# Altium footprint library MPPT_Power_board.PcbLib: 31 footprints (part 1 of 2)
Each footprint in its own frame and in the unit in brackets; x right, y up, seen from the top. Pads: shape width x height; smd on the part's side, far side on the other; paste and mask are expansions set on the pad; w line width, h text height; cw(c..) or ccw(c..) is an arc to the next point about the centre after c.
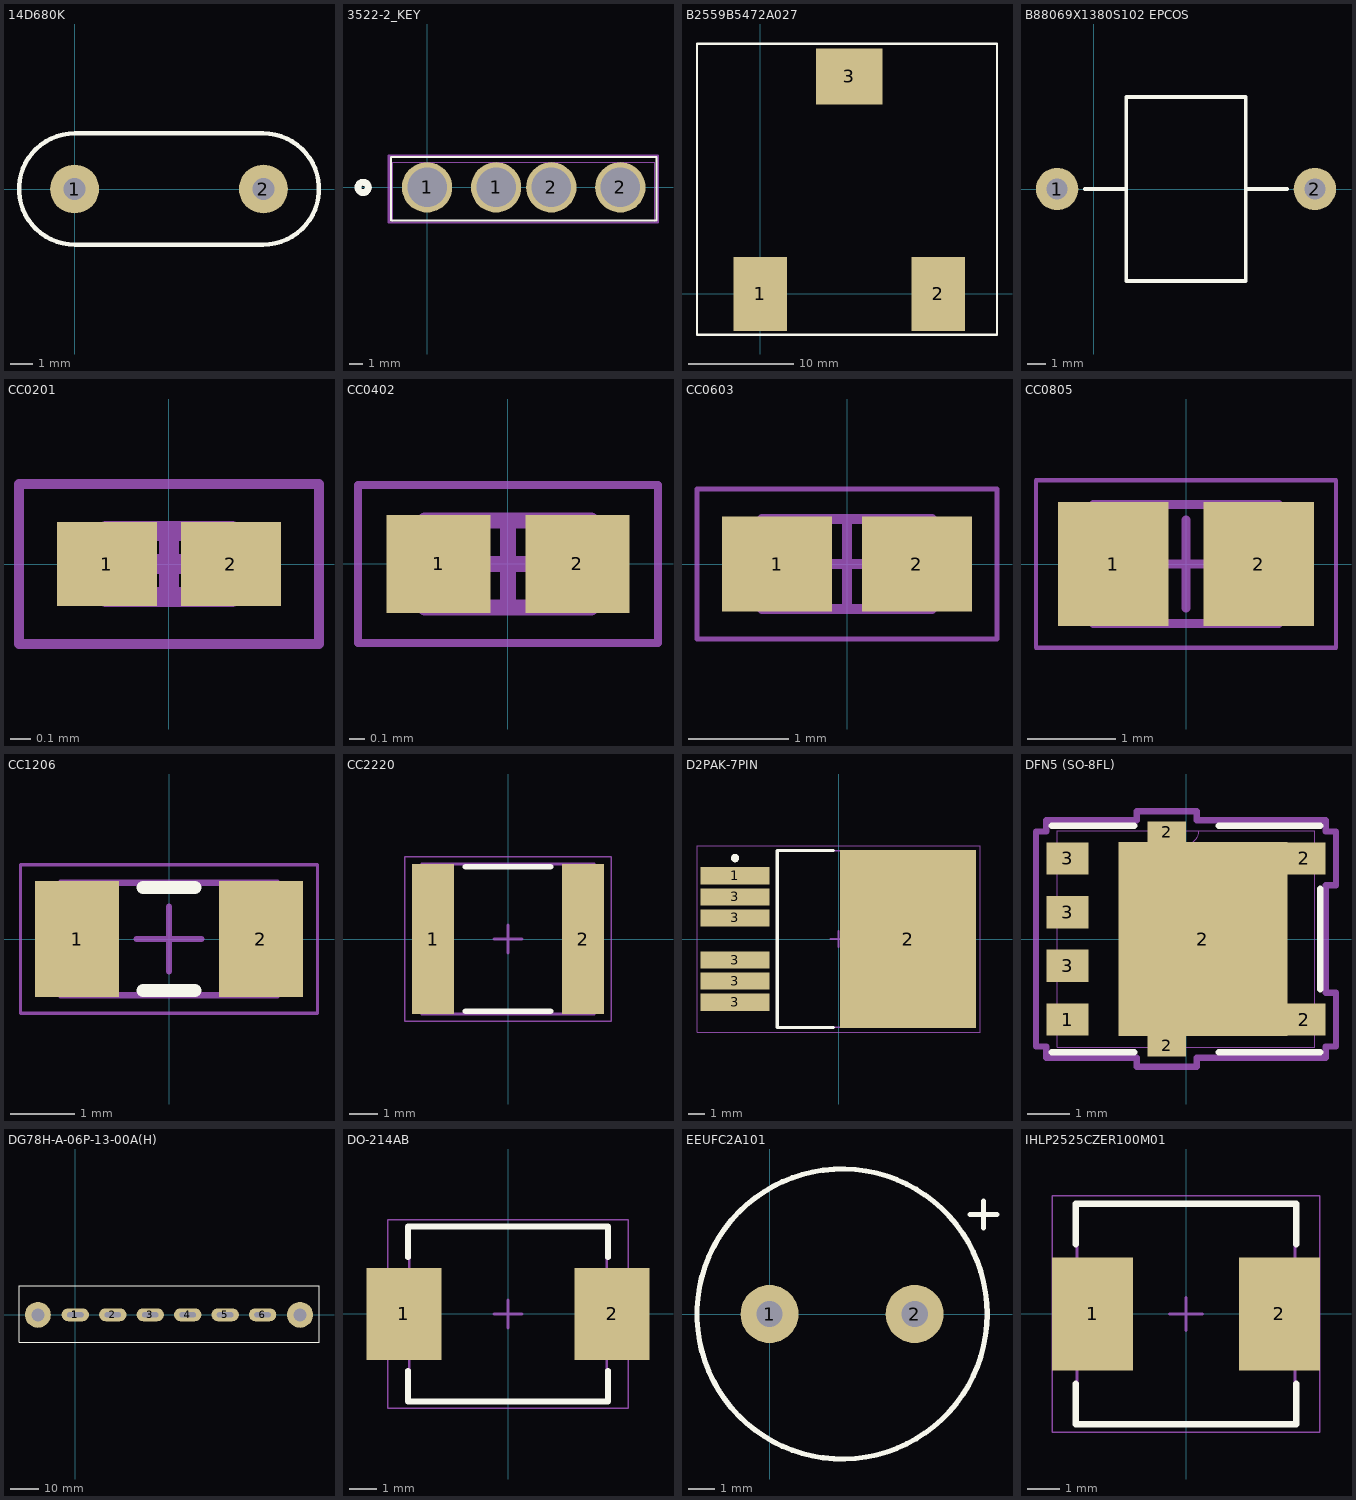
[diagram p0: the footprints below, top view; thin cyan lines are the x and y axes]

## 14D680K [mm]
pads (2):
  round 2.2 hole 1: 1(0,0) 2(8.5,0)
Top Overlay:
  lines w0.2: 0,-2.5 cw(c0,0) 0,2.5 8.5,2.5 cw(c8.5,0) 8.5,-2.5 0,-2.5

## 3522-2_KEY [mm]
pads (4):
  round 3.7 hole 2.9 paste-2539.97 mask+0: 1(0,0) 1(5.08,0) 2(9.144,0) 2(14.224,0)
Top Overlay:
  circle w0.508: c-4.699,0 r0.381
  lines w0.152: -2.667,-2.45 16.891,-2.45 16.891,2.25 -2.667,2.25 -2.667,-2.45
Bottom Overlay:
  circle w0.508: c-4.699,0 r0.381
Mechanical 13:
  circle w0.508: c0,0 r0.381
  lines w0.025: -2.54,-2.591 16.764,-2.591 16.764,1.854 -2.54,1.854 -2.54,-2.591
Mechanical 15:
  lines w0.152: -2.819,-2.595 -2.819,2.358 16.993,2.358 16.993,-2.595 -2.819,-2.595
3D body "3522-2.STEP": height 7.62, standoff -3.48, extent -2.552,-2.322 16.752,2.123

## B2559B5472A027 [mm]
pads (3):
  rect 5.1x7 smd: 1(0,0) 2(16.9,0)
  rect 6.3x5.3 smd: 3(8.45,20.65)
Top Overlay:
  lines w0.2: -6,-3.875 -6,23.75 -2.875,23.75 5.9,23.75 19.75,23.75 22.475,23.75 22.475,-3.875 19.75,-3.875 -2.875,-3.875 -6,-3.875
3D body "B82559BxA027_ERU27_14.6mm_MAX_public_TDK-PC.step": height 15.02, standoff 0.01, extent -5.675,-2.95 22.125,22.86

## B88069X1380S102 EPCOS [mm]
pads (2):
  round 2.3 hole 1.15: 1(-2,0) 2(12,0)
Top Overlay:
  lines w0.2: -0.5,0 1.75,0 ; 8.25,0 10.5,0 ; 1.75,-5 1.75,5 8.25,5 8.25,-5 1.75,-5

## CC0201 [mm] "Chip Capacitor, 2-Leads, Body 0,60x0,30mm, IPC Medium Density"
height 0.33
pads (2):
  rect 0.5x0.42 smd: 1(-0.31,0) 2(0.31,0)
Mechanical 13:
  lines w0.1: -0.315,-0.165 0.315,-0.165 0.315,0.165 -0.315,0.165 -0.315,-0.165
Mechanical 15:
  lines w0.05: -0.75,-0.4 0.75,-0.4 0.75,0.4 -0.75,0.4 -0.75,-0.4
  lines w0.1: -0.165,0 0.165,0 ; 0,-0.165 0,0.165
3D body "CAPC0603X03N.step": height 0.33, standoff 0, extent -0.315,-0.165 0.315,0.165

## CC0402 [mm] "Chip Capacitor, 2-Leads, Body 1,00x0,50mm, IPC Medium Density"
height 0.55
pads (2):
  rect 0.66x0.62 smd: 1(-0.44,0) 2(0.44,0)
Mechanical 13:
  lines w0.1: -0.525,-0.275 0.525,-0.275 0.525,0.275 -0.525,0.275 -0.525,-0.275
Mechanical 15:
  lines w0.05: -0.95,-0.5 0.95,-0.5 0.95,0.5 -0.95,0.5 -0.95,-0.5
  lines w0.1: -0.275,0 0.275,0 ; 0,-0.275 0,0.275
3D body "CAPC1005X06N.step": height 0.55, standoff 0, extent -0.525,-0.275 0.525,0.275

## CC0603 [mm] "Chip Capacitor, 2-Leads, Body 1,60x0,80mm, IPC Medium Density"
height 0.9
pads (2):
  rect 1.1x0.95 smd: 1(-0.7,0) 2(0.7,0)
Mechanical 13:
  lines w0.1: -0.85,-0.45 0.85,-0.45 0.85,0.45 -0.85,0.45 -0.85,-0.45
Mechanical 15:
  lines w0.05: -1.5,-0.75 1.5,-0.75 1.5,0.75 -1.5,0.75 -1.5,-0.75
  lines w0.1: -0.45,0 0.45,0 ; 0,-0.45 0,0.45
3D body "CAPC1608X09N.step": height 0.9, standoff 0, extent -0.85,-0.45 0.85,0.45

## CC0805 [mm] "Chip Capacitor, 2-Leads, Body 2,00x1,25mm, IPC Medium Density"
height 0.7
pads (2):
  rect 1.25x1.4 smd: 1(-0.825,0) 2(0.825,0)
Mechanical 13:
  lines w0.1: -1.05,-0.675 1.05,-0.675 1.05,0.675 -1.05,0.675 -1.05,-0.675
Mechanical 15:
  lines w0.05: -1.7,-0.95 1.7,-0.95 1.7,0.95 -1.7,0.95 -1.7,-0.95
  lines w0.1: -0.5,0 0.5,0 ; 0,-0.5 0,0.5
3D body "CAPC2012X07N.step": height 0.7, standoff 0, extent -1.05,-0.675 1.05,0.675

## CC1206 [mm] "Chip Capacitor, 2-Leads, Body 3,20x1,60mm, IPC Medium Density"
height 0.95
pads (2):
  rect 1.3x1.8 smd: 1(-1.425,0) 2(1.425,0)
Top Overlay:
  lines w0.2: -0.4,-0.8 0.4,-0.8 ; -0.4,0.8 0.4,0.8
Mechanical 13:
  lines w0.1: -1.675,-0.875 1.675,-0.875 1.675,0.875 -1.675,0.875 -1.675,-0.875
Mechanical 15:
  lines w0.05: -2.3,-1.15 2.3,-1.15 2.3,1.15 -2.3,1.15 -2.3,-1.15
  lines w0.1: -0.5,0 0.5,0 ; 0,-0.5 0,0.5
3D body "CAPC3216X10N.step": height 0.95, standoff 0, extent -1.675,-0.875 1.675,0.875

## CC2220 [mm] "Chip Capacitor, 2-Leads, Body 5,70x5,00mm, IPC Medium Density"
height 1.25
pads (2):
  rect 1.5x5.3 smd: 1(-2.65,0) 2(2.65,0)
Top Overlay:
  lines w0.2: -1.5,-2.55 1.5,-2.55 ; -1.5,2.55 1.5,2.55
Mechanical 13:
  lines w0.1: -3.05,-2.65 3.05,-2.65 3.05,2.65 -3.05,2.65 -3.05,-2.65
Mechanical 15:
  lines w0.05: -3.65,-2.9 3.65,-2.9 3.65,2.9 -3.65,2.9 -3.65,-2.9
  lines w0.1: -0.5,0 0.5,0 ; 0,-0.5 0,0.5
3D body "CAPC5750X12N.step": height 1.25, standoff 0, extent -3.05,-2.65 3.05,2.65

## D2PAK-7PIN [mm] "D2-PAK, 7-Pads, Body 7,93x8,70mm (max), IPC Medium Density"
height 4.83
pads (7):
  rect 4.15x1.05 smd: 1(-6.25,3.81) 3(-6.25,-3.81) 3(-6.25,-2.54) 3(-6.25,-1.27) 3(-6.25,1.27) 3(-6.25,2.54)
  rect 8.2x10.75 smd: 2(4.2,0)
Top Overlay:
  circle w0.25: c-6.25,4.885 r0.125
  lines w0.2: -0.3,-5.35 -3.7,-5.35 -3.7,5.35 -0.3,5.35
Mechanical 13:
  lines w0.1: -3.7,-5.325 -3.7,5.325 5.95,5.325 5.95,-5.325 -3.7,-5.325
Mechanical 15:
  lines w0.05: -8.55,-5.625 -8.55,5.625 8.55,5.625 8.55,-5.625 -8.55,-5.625
  lines w0.1: -0.5,0 0.5,0 ; 0,-0.5 0,0.5
3D body "DPAK127P1524X483-7N.step": height 5.21, standoff 0, extent -7.405,-5.325 7.84,5.325

## DFN5 (SO-8FL) [mm]
pads (9):
  rect 0.991x0.762 smd paste+0 mask+0: 1(-2.795,-1.905) 2(2.795,-1.905) 2(2.795,1.905) 3(-2.795,-0.635) 3(-2.795,0.635) 3(-2.795,1.905)
  rect 0.905x0.495 smd paste-2539.97 mask+0: 2(-0.452,-2.525) 2(-0.452,2.525)
  rect 4x4.59 smd paste-2539.97 mask+0: 2(0.4,0)
Top Overlay:
  lines w0.152: -3.175,-2.68 -1.226,-2.68 ; -3.175,2.68 -1.226,2.68 ; 0.773,-2.68 3.175,-2.68 ; 0.773,2.68 3.175,2.68 ; 3.175,-1.191 3.175,1.191
Top Paste:
  region: -0.769,2.186 -1.907,2.186 -1.907,0.862 -0.769,0.862
  region: -0.769,0.662 -1.907,0.662 -1.907,-0.662 -0.769,-0.662
  region: -0.769,-0.862 -1.907,-0.862 -1.907,-2.186 -0.769,-2.186
  region: 0.569,2.186 -0.569,2.186 -0.569,0.862 0.569,0.862
  region: 0.569,0.662 -0.569,0.662 -0.569,-0.662 0.569,-0.662
  region: 0.569,-0.862 -0.569,-0.862 -0.569,-2.186 0.569,-2.186
  region: 1.907,2.186 0.769,2.186 0.769,0.862 1.907,0.862
  region: 1.907,0.662 0.769,0.662 0.769,-0.662 1.907,-0.662
  region: 1.907,-0.862 0.769,-0.862 0.769,-2.186 1.907,-2.186
Top Solder:
  region: 0,2.286 -0.905,2.286 -0.905,2.769 0,2.769 0,2.286
  region: 0,-2.286 -0.905,-2.286 -0.905,-2.769 0,-2.769 0,-2.286
Mechanical 13:
  lines w0: -0.305,2.553 ccw(c0,2.553) 0.305,2.553
  lines w0.025: -3.048,-2.553 3.048,-2.553 3.048,2.553 -3.048,2.553 -3.048,-2.553
Mechanical 15:
  lines w0.152: -3.544,-2.54 -3.544,2.54 -3.302,2.54 -3.302,2.807 -1.159,2.807 -1.159,3.023 0.254,3.023 0.254,2.807 3.302,2.807 3.302,2.54 3.544,2.54 3.544,1.27 3.302,1.27 3.302,-1.27 3.544,-1.27 3.544,-2.54 3.302,-2.54 3.302,-2.807 0.254,-2.807 0.254,-3.023 -1.159,-3.023 -1.159,-2.807 -3.302,-2.807 -3.302,-2.54 -3.544,-2.54
3D body "NTMFS5C628NLT1G.step": height 1.11, standoff 0.01, extent -3.075,-2.575 3.075,2.575

## DG78H-A-06P-13-00A(H) [mm]
pads (9):
  oval 9.5x4.5 hole 1.7 slot 5.7 at 0 deg paste-2539.97 mask+0: 1(0,0) 1(0,0) 2(13,0) 3(26,0) 4(39,0) 5(52,0) 6(65,0)
  round 9 hole 4.5 paste-2539.97 mask+0: ""(-13,0) ""(78,0)
Top Overlay:
  lines w0.2: -19.55,-9.5 -19.55,10.05 84.575,10.05 84.575,-9.5 -19.325,-9.5 -19.55,-9.5
3D body "DG78R-A-06P-13-00A&Z(H) (1).stp": height 22.01, standoff -4.69, extent -19.496,-12.6 84.5,10

## DO-214AB [mm] "Molded Capacitor, 2-Leads, Body 6,86x5,91mm, IPC Medium Density"
height 2.62
pads (2):
  rect 2.7x3.3 smd: 1(-3.75,0) 2(3.75,0)
Top Overlay:
  lines w0.2: -3.6,-2.05 -3.6,-3.15 3.6,-3.15 3.6,-2.05 ; -3.6,2.05 -3.6,3.15 3.6,3.15 3.6,2.05
Mechanical 13:
  lines w0.1: -3.555,-3.11 -3.555,3.11 3.555,3.11 3.555,-3.11 -3.555,-3.11
Mechanical 15:
  lines w0.05: -4.325,-3.4 -4.325,3.4 4.325,3.4 4.325,-3.4 -4.325,-3.4
  lines w0.1: -0.5,0 0.5,0 ; 0,-0.5 0,0.5
3D body "CAPM6959X26N.step": height 2.62, standoff 0, extent -3.775,-3.11 3.775,3.11

## EEUFC2A101 [mm]
pads (2):
  round 2.2 hole 1: 1(0,0) 2(5.5,0)
Top Overlay:
  circle w0.2: c2.75,0 r5.5
  lines w0.2: 7.607,3.775 8.623,3.775 ; 8.115,3.267 8.115,4.283
3D body "PCAP_10x20-THRU-ELECT_NCA.step": height 19.95, standoff -4.83, extent -2.291,-5.025 7.741,4.977

## IHLP2525CZER100M01 [mm] "Molded Inductor, 2-Leads, Body 6,47x6,47mm, IPC Medium Density"
height 3
pads (2):
  rect 2.5x3.5 smd: 1(-2.877,0) 2(2.877,0)
Top Overlay:
  lines w0.2: -3.4,-2.15 -3.4,-3.4 3.4,-3.4 3.4,-2.15 ; -3.4,2.15 -3.4,3.4 3.4,3.4 3.4,2.15
Mechanical 13:
  lines w0.1: -3.36,-3.36 3.36,-3.36 3.36,3.36 -3.36,3.36 -3.36,-3.36
Mechanical 15:
  lines w0.05: -4.125,-3.65 4.125,-3.65 4.125,3.65 -4.125,3.65 -4.125,-3.65
  lines w0.1: -0.5,0 0.5,0 ; 0,-0.5 0,0.5
3D body "INDM6565X30N.step": height 3, standoff 0, extent -3.58,-3.36 3.58,3.36